# Altium schematic symbol library Schematic.SchLib: 2 symbols
Pins are listed as number, name and electrical type; pins without a type are passive.

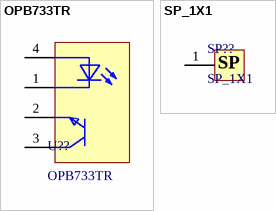
[diagram p0: symbols OPB733TR to SP_1X1]

## OPB733TR
designator U??
Manufacturer Part Number: OPB733TR
footprint OPTO-SMD_OPB733TR
pins: 1 C, 2 E, 3 C, 4 A

## SP_1X1
designator SP??
Manufacturer Part Number: NILL
footprint SP_1x1mm
pins: 1
text: SP